# Altium footprint library Diode.PcbLib: 15 footprints
Each footprint in its own frame and in the unit in brackets; x right, y up, seen from the top. Pads: shape width x height; smd on the part's side, far side on the other; paste and mask are expansions set on the pad; w line width, h text height; cw(c..) or ccw(c..) is an arc to the next point about the centre after c.
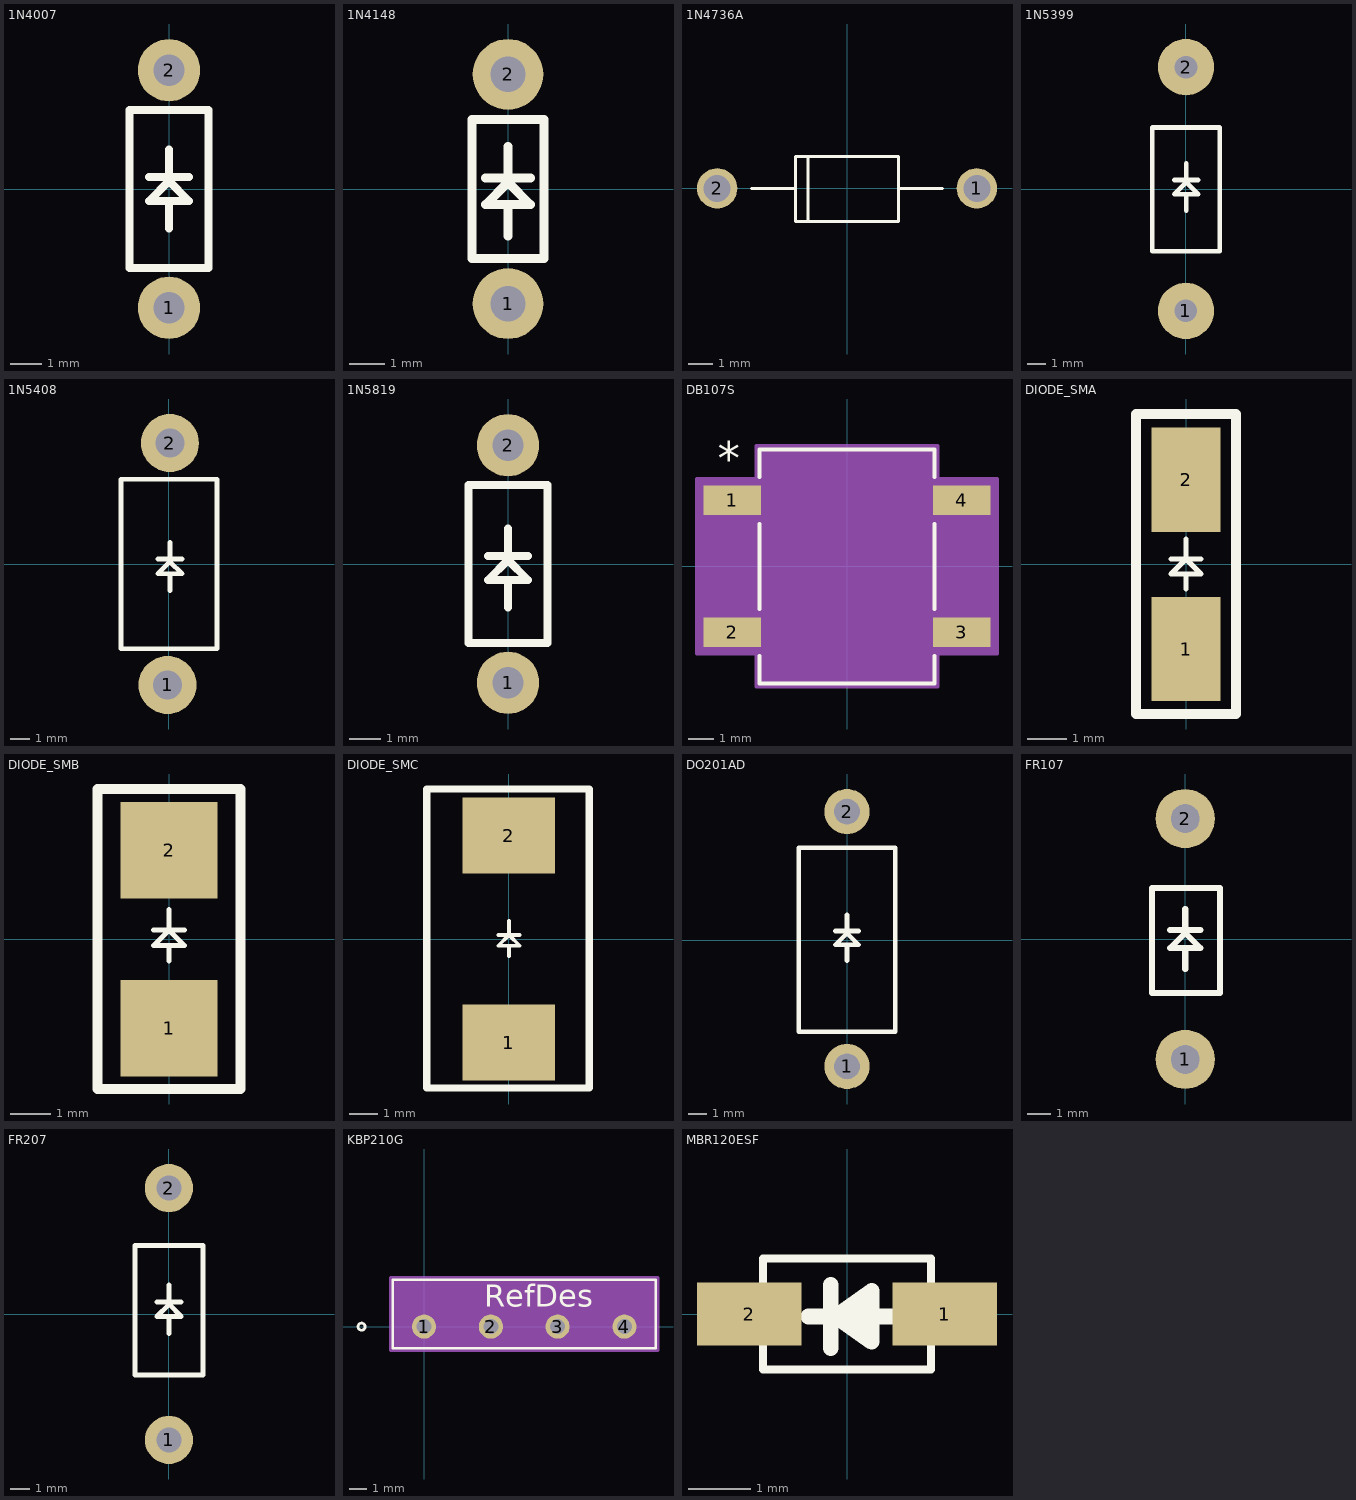
[diagram p0: the footprints below, top view; thin cyan lines are the x and y axes]

## 1N4007 [mm] "Rectifier Diode 1000V 1A DO-41"
pads (2):
  round 2 hole 1: 1(0,-3.81) 2(0,3.81)
Top Overlay:
  lines w0.254: -0.635,0.381 0.635,0.381 ; 0,-1.27 0,-0.381 ; 0,0.381 0,1.27 ; 0,-0.381 0.635,-0.381 0,0.254 -0.635,-0.381 0,-0.381 ; -1.27,-2.54 -1.27,2.54 1.27,2.54 1.27,-2.54 -1.27,-2.54
3D body "1N4007 (7,62mm).step": height 3.35, standoff -24.61, extent -1.35,-4.24 1.35,4.24

## 1N4148 [mm] "Diode Gen Purp 75V 300mA DO35"
pads (2):
  round 2 hole 1: 1(0,-3.238) 2(0,3.238)
Top Overlay:
  lines w0.254: -0.635,0.318 0.635,0.318 ; 0,-1.333 0,-0.445 ; 0,0.318 0,1.206 ; 0,-0.445 0.635,-0.445 0,0.191 -0.635,-0.445 0,-0.445 ; -1.016,-1.968 -1.016,1.968 1.016,1.968 1.016,-1.968 -1.016,-1.968
3D body "1N4148 (6,416mm).step": height 3, standoff -27.1, extent -1,-3.488 1,3.488

## 1N4736A [mm]
pads (2):
  round 1.65 hole 1.1: 1(5.3,0) 2(-5.3,0)
Top Overlay:
  lines w0.127: -3.9,0 -2.1,0 ; 3.9,0 2.1,0 ; -2.1,0 -2.1,-1.35 -1.6,-1.35 ; -2.1,0 -2.1,1.3 -1.6,1.3 ; -1.6,-1.35 -1.6,1.3 ; -1.6,-1.35 2.1,-1.35 2.1,0 ; -1.6,1.3 2.1,1.3 2.1,0
3D body "step_temp.STEP": height 2.68, standoff -21.77, extent -5.474,-1.346 5.474,1.346

## 1N5399 [mm] "Diode Gen Purp 1000V 1.5A DO15"
pads (2):
  round 3 hole 1.2: 1(0,-6.499) 2(0,6.499)
Top Overlay:
  lines w0.254: -0.617,0.486 0.653,0.486 ; 0.018,-1.165 0.018,-0.276 ; 0.018,0.486 0.018,1.375 ; 0.018,-0.276 -0.617,-0.276 0.018,0.359 0.653,-0.276 0.018,-0.276 ; -1.8,-3.324 1.8,-3.324 1.8,3.28 -1.8,3.28 -1.8,-3.324
3D body "1N5399.STEP": height 3.6, standoff -17.1, extent -1.8,-6.9 1.8,6.9

## 1N5408 [mil] "Diode Gen Purp 1000V 3A DO15"
pads (2):
  round 120 hole 60: 1(-2.5,-250) 2(2.5,250)
Top Overlay:
  lines w10: -22.5,10 27.5,10 ; 2.5,-55 2.5,-20 ; 2.5,10 2.5,45 ; 2.5,-20 -22.5,-20 2.5,5 27.5,-20 2.5,-20 ; -98.92,-175 -98.92,175 100,175 100,-175 -98.92,-175
3D body "1N5408.step": height 216.97, standoff -112.2, extent -98.86,-273.62 98.86,273.62

## 1N5819 [mm] "Rectifier Schottky 40V 1A DO-15"
pads (2):
  round 2 hole 1: 1(0,-3.81) 2(0,3.81)
Top Overlay:
  lines w0.254: -0.635,0.254 0.635,0.254 ; 0,-1.397 0,-0.508 ; 0,0.254 0,1.143 ; 0,-0.508 -0.635,-0.508 0,0.127 0.635,-0.508 0,-0.508 ; -1.27,-2.54 1.27,-2.54 1.27,2.54 -1.27,2.54 -1.27,-2.54
3D body "1N5819 (7,62mm).step": height 3.35, standoff -24.61, extent -1.35,-4.24 1.35,4.24

## DB107S [mm]
pads (4):
  rect 2.224x1.142 smd paste+0 mask+0: 1(-4.432,2.55) 2(-4.432,-2.55) 3(4.432,-2.55) 4(4.432,2.55)
Top Overlay:
  lines w0.152: -3.378,-3.454 -3.378,-4.521 3.378,-4.521 3.378,-3.454 ; -3.378,-1.646 -3.378,1.646 ; -3.378,3.454 -3.378,4.521 3.378,4.521 3.378,3.454 ; 3.378,-1.646 3.378,1.646
  text "*" at -5.004,3.565 h1.27
  text ".Designator" at -3.492,-0.635 h1.27
Mechanical 13:
  lines w0.025: -0.305,4.394 ccw(c0,4.394) 0.305,4.394 ; -5.194,-3.096 -3.251,-3.096 -3.251,-2.004 -5.194,-2.004 -5.194,-3.096 ; -5.194,2.004 -3.251,2.004 -3.251,3.096 -5.194,3.096 -5.194,2.004 ; -3.251,-4.394 -3.251,4.394 3.251,4.394 3.251,-4.394 -3.251,-4.394 ; 3.251,-3.096 5.194,-3.096 5.194,-2.004 3.251,-2.004 3.251,-3.096 ; 3.251,2.004 5.194,2.004 5.194,3.096 3.251,3.096 3.251,2.004
  text ".Designator" at -3.492,-0.635 h1.27
  text "*" at -3.188,3.048 h1.27
Mechanical 15:
  region: -3.505,-3.375 -5.798,-3.375 -5.798,3.375 -3.505,3.375 -3.505,4.648 3.505,4.648 3.505,3.375 5.798,3.375 5.798,-3.375 3.505,-3.375 3.505,-4.648 -3.505,-4.648
  lines w0.152: -5.798,-3.375 -3.505,-3.375 -3.505,-4.648 3.505,-4.648 3.505,-3.375 5.798,-3.375 5.798,3.375 3.505,3.375 3.505,4.648 -3.505,4.648 -3.505,3.375 -5.798,3.375 -5.798,-3.375
3D body "SOIC_B107S_RTN.step": height 3.41, standoff 0, extent -5.194,-4.394 5.194,4.394

## DIODE_SMA [mm] "Diode SMA"
pads (2):
  rect 1.75x2.65 smd: 1(0,-2.15) 2(0,2.15)
Top Overlay:
  lines w0.127: -0.381,0.136 0.381,0.136 ; 0,-0.626 0,-0.245 ; 0,0.644 0,0.136 ; 0,-0.245 0.381,-0.245 0,0.136 ; 0,-0.245 -0.381,-0.245 0,0.136
  lines w0.254: -1.27,-3.801 1.27,-3.801 1.27,3.819 -1.27,3.819 -1.27,-3.801
3D body "SMA.step": height 2.2, standoff 0, extent -1.302,-2.598 1.302,2.598

## DIODE_SMB [mil] "Diode SMB"
pads (2):
  rect 94.5x94.5 smd: 1(0,-87) 2(0,87)
Top Overlay:
  lines w5: -15,8.82 15,8.82 ; 0,-21.18 0,-6.18 ; 0,28.82 0,8.82 ; 0,-6.18 15,-6.18 0,8.82 ; 0,-6.18 -15,-6.18 0,8.82
  lines w10: -70,-146.5 -70,146.81 70,146.81 70,-146.5 -70,-146.5
3D body "SMB.step": height 86.81, standoff 0, extent -71.26,-104.23 71.26,104.23

## DIODE_SMC [mm] "Diode SMC"
pads (2):
  rect 3.3x2.7 smd: 1(0,-3.686) 2(0,3.686)
Top Overlay:
  lines w0.127: -0.372,0.147 0.39,0.147 ; 0.009,-0.615 0.009,-0.234 ; 0.009,0.655 0.009,0.147 ; 0.009,-0.234 -0.372,-0.234 0.009,0.147 ; 0.009,-0.234 0.39,-0.234 0.009,0.147
  lines w0.254: -2.921,-5.305 -2.921,5.345 2.867,5.345 2.867,-5.305 -2.921,-5.305
3D body "SMC.step": height 2.27, standoff 0, extent -2.953,-3.97 2.953,3.97

## DO201AD [mm] "DO201AD"
pads (2):
  round 2.5 hole 1.4 slot 1.405 at 90 deg: 1(0,-6.985) 2(0,7.112)
Top Overlay:
  lines w0.254: -0.635,0.508 0.635,0.508 ; 0,-1.143 0,-0.254 ; 0,0.508 0,1.397 ; 0,-0.254 0.635,-0.254 0,0.381 -0.635,-0.254 0,-0.254 ; -2.667,-5.057 2.667,-5.057 2.667,5.103 -2.667,5.103 -2.667,-5.057
3D body "DO-201AD.stp": height 5.65, standoff -3.66, extent -2.642,-7.727 2.642,7.727

## FR107 [mm] "Diode Gen Purp 1000V 1A DO41"
pads (2):
  round 2.5 hole 1.2 slot 1.205 at 90 deg: 1(0,-5.08) 2(0,5.08)
Top Overlay:
  lines w0.254: -0.635,0.381 0.635,0.381 ; 0,-1.27 0,-0.381 ; 0,0.381 0,1.27 ; 0,-0.381 0.635,-0.381 0,0.254 -0.635,-0.381 0,-0.381 ; -1.397,-2.286 -1.397,2.159 1.46,2.159 1.46,-2.286 -1.397,-2.286
3D body "FR107.STEP": height 2.68, standoff -21.77, extent -1.346,-5.474 1.346,5.474

## FR207 [mm] "Diode Gen Purp 1000V 2A DO15"
pads (2):
  round 2.5 hole 1.3: 1(0,-6.54) 2(0,6.54)
Top Overlay:
  lines w0.254: -0.628,0.632 0.642,0.632 ; 0.007,-1.019 0.007,-0.13 ; 0.007,0.632 0.007,1.521 ; 0.007,-0.13 0.642,-0.13 0.007,0.505 -0.628,-0.13 0.007,-0.13 ; -1.771,-3.178 1.778,-3.178 1.778,3.553 -1.771,3.553 -1.771,-3.178
3D body "FR207.STEP": height 3.6, standoff -17.1, extent -1.793,-6.903 1.807,6.897

## KBP210G [mil]
pads (4):
  round 54 / inner round 60 / far side round 54 hole 34 paste-99999 mask+0: 1(0,0) 2(150,0) 3(300,0) 4(450,0)
Top Overlay:
  circle w6: c-140.5,0 r8
  lines w6: -65.5,105.39 515.5,105.39 ; -70.5,-48.61 -70.5,105.39 520.5,105.39 520.5,-48.61 -70.5,-48.61
  text "RefDes" at 135,45 h50
Mechanical 13:
  circle w0: c-55.5,-33.61 r8
  lines w1: -65.5,100.39 -65.5,-43.61 515.5,-43.61 515.5,100.39 ; -65.5,100.39 515.5,100.39 ; -65.5,100.39 515.5,100.39
  text "RefDes2" at 137.5,3.39 h50
  text "TAB" at 206.25,87.89 h25
Mechanical 15:
  region: 525.5,110.39 -75.5,110.39 -75.5,-53.61 525.5,-53.61
  lines w6: -75.5,-53.61 525.5,-53.61 525.5,110.39 -75.5,110.39 -75.5,-53.61
3D body "TO_P2005G_DIO.step": height 807.99, standoff -195.98, extent -65.51,-43.62 515.51,100.39

## MBR120ESF [mm]
pads (2):
  rect 1.68x1.01 smd: 1(1.57,0) 2(-1.57,0)
Top Overlay:
  region: 0.399,-0.445 0.399,0.367 -0.186,-0.039
  lines w0.127: -1.35,-0.889 1.35,-0.889 1.35,0.889 -1.35,0.889 -1.35,-0.889
  lines w0.254: -0.618,-0.039 -0.288,-0.039 ; -0.262,-0.547 -0.262,0.469 ; 0.399,-0.039 0.712,-0.039 ; -0.186,-0.039 0.399,0.367 0.399,-0.445 -0.186,-0.039
3D body "step_temp.STEP": height 1.27, standoff -0.03, extent -1.831,-0.902 1.869,0.898